# Altium integrated library REC20K-4805SZ.IntLib: 1 symbol
Pins are listed as number, name and electrical type; pins without a type are passive.

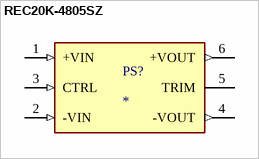
[diagram p0: symbol REC20K-4805SZ]

## REC20K-4805SZ
designator PS?
MF: Recom Power; MP: REC20K-4805SZ; Package: None; Price: None; Value: *; Availability: Unavailable
footprint CONV_REC20K-4805SZ
pins: 1 +VIN (in), 2 -VIN (in), 3 CTRL (in), 4 -VOUT (out), 5 TRIM, 6 +VOUT (out)